# Altium footprint library IPS2050HTR.PcbLib: 3 footprints
Each footprint in its own frame and in the unit in brackets; x right, y up, seen from the top. Pads: shape width x height; smd on the part's side, far side on the other; paste and mask are expansions set on the pad; w line width, h text height; cw(c..) or ccw(c..) is an arc to the next point about the centre after c.
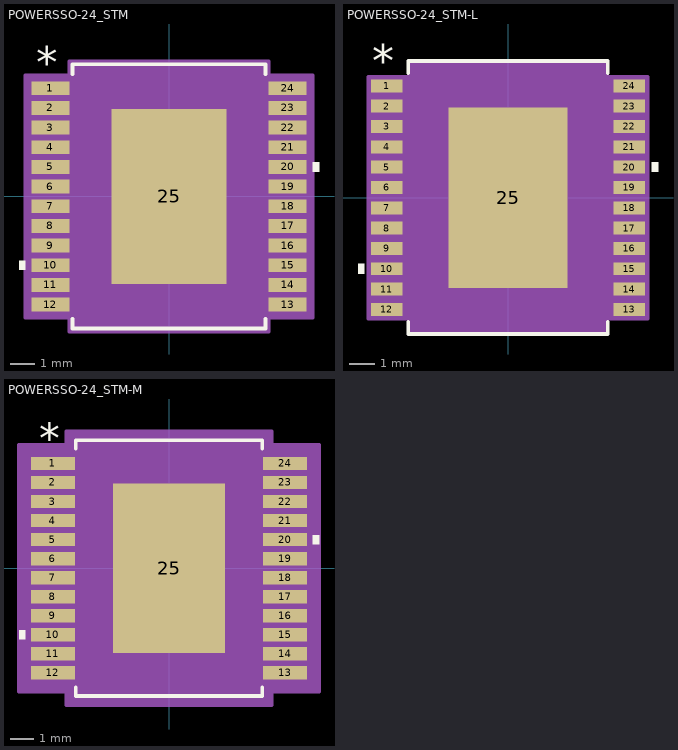
[diagram p0: the footprints below, top view; thin cyan lines are the x and y axes]

## POWERSSO-24_STM [mil]
pads (25):
  rect 60.56x21.97 smd paste+0 mask+0: 1(-190,173.25) 2(-190,141.75) 3(-190,110.25) 4(-190,78.75) 5(-190,47.25) 6(-190,15.75) 7(-190,-15.75) 8(-190,-47.25) 9(-190,-78.75) 10(-190,-110.25) 11(-190,-141.75) 12(-190,-173.25) 13(190,-173.25) 14(190,-141.75) 15(190,-110.25) 16(190,-78.75) 17(190,-47.25) 18(190,-15.75) 19(190,15.75) 20(190,47.25) 21(190,78.75) 22(190,110.25) 23(190,141.75) 24(190,173.25)
  rect 185x280 smd paste-139.5 mask+0: 25(0,0)
Top Overlay:
  region: -230.28,-102.75 -240.28,-102.75 -240.28,-117.75 -230.28,-117.75
  region: 230.28,54.75 240.28,54.75 240.28,39.75 230.28,39.75
  lines w6: -154.5,-196.25 -154.5,-211.5 154.5,-211.5 154.5,-196.25 ; -154.5,196.25 -154.5,211.5 154.5,211.5 154.5,196.25
  text "*" at -212.5,190.22 h50
  text ".Designator" at -137.5,-25 h50
Top Paste:
  region: -34.77,136.06 -88.56,136.06 -88.56,87.94 -34.77,87.94
  region: -34.77,80.06 -88.56,80.06 -88.56,31.94 -34.77,31.94
  region: -34.77,24.06 -88.56,24.06 -88.56,-24.06 -34.77,-24.06
  region: -34.77,-31.94 -88.56,-31.94 -88.56,-80.06 -34.77,-80.06
  region: -34.77,-87.94 -88.56,-87.94 -88.56,-136.06 -34.77,-136.06
  region: 26.9,136.06 -26.9,136.06 -26.9,87.94 26.9,87.94
  region: 26.9,80.06 -26.9,80.06 -26.9,31.94 26.9,31.94
  region: 26.9,24.06 -26.9,24.06 -26.9,-24.06 26.9,-24.06
  region: 26.9,-31.94 -26.9,-31.94 -26.9,-80.06 26.9,-80.06
  region: 26.9,-87.94 -26.9,-87.94 -26.9,-136.06 26.9,-136.06
  region: 88.56,136.06 34.77,136.06 34.77,87.94 88.56,87.94
  region: 88.56,80.06 34.77,80.06 34.77,31.94 88.56,31.94
  region: 88.56,24.06 34.77,24.06 34.77,-24.06 88.56,-24.06
  region: 88.56,-31.94 34.77,-31.94 34.77,-80.06 88.56,-80.06
  region: 88.56,-87.94 34.77,-87.94 34.77,-136.06 88.56,-136.06
Mechanical 13:
  lines w1: -12,206.5 ccw(c0,206.5) 12,206.5 ; -206.5,-183.25 -206.5,-163.25 -149.5,-163.25 -149.5,-183.25 -206.5,-183.25 ; -206.5,-151.75 -206.5,-131.75 -149.5,-131.75 -149.5,-151.75 -206.5,-151.75 ; -206.5,-120.25 -206.5,-100.25 -149.5,-100.25 -149.5,-120.25 -206.5,-120.25 ; -206.5,-88.75 -206.5,-68.75 -149.5,-68.75 -149.5,-88.75 -206.5,-88.75 ; -206.5,-57.25 -206.5,-37.25 -149.5,-37.25 -149.5,-57.25 -206.5,-57.25 ; -206.5,-25.75 -206.5,-5.75 -149.5,-5.75 -149.5,-25.75 -206.5,-25.75 ; -206.5,5.75 -206.5,25.75 -149.5,25.75 -149.5,5.75 -206.5,5.75 ; -206.5,37.25 -206.5,57.25 -149.5,57.25 -149.5,37.25 -206.5,37.25 ; -206.5,68.75 -206.5,88.75 -149.5,88.75 -149.5,68.75 -206.5,68.75 ; -206.5,100.25 -206.5,120.25 -149.5,120.25 -149.5,100.25 -206.5,100.25 ; -206.5,131.75 -206.5,151.75 -149.5,151.75 -149.5,131.75 -206.5,131.75 ; -206.5,163.25 -206.5,183.25 -149.5,183.25 -149.5,163.25 -206.5,163.25 ; -149.5,-206.5 149.5,-206.5 149.5,206.5 -149.5,206.5 -149.5,-206.5 ; 149.5,-183.25 149.5,-163.25 206.5,-163.25 206.5,-183.25 149.5,-183.25 ; 149.5,-151.75 149.5,-131.75 206.5,-131.75 206.5,-151.75 149.5,-151.75 ; 149.5,-120.25 149.5,-100.25 206.5,-100.25 206.5,-120.25 149.5,-120.25 ; 149.5,-88.75 149.5,-68.75 206.5,-68.75 206.5,-88.75 149.5,-88.75 ; 149.5,-57.25 149.5,-37.25 206.5,-37.25 206.5,-57.25 149.5,-57.25 ; 149.5,-25.75 149.5,-5.75 206.5,-5.75 206.5,-25.75 149.5,-25.75 ; 149.5,5.75 149.5,25.75 206.5,25.75 206.5,5.75 149.5,5.75 ; 149.5,37.25 149.5,57.25 206.5,57.25 206.5,37.25 149.5,37.25 ; 149.5,68.75 149.5,88.75 206.5,88.75 206.5,68.75 149.5,68.75 ; 149.5,100.25 149.5,120.25 206.5,120.25 206.5,100.25 149.5,100.25 ; 149.5,131.75 149.5,151.75 206.5,151.75 206.5,131.75 149.5,131.75 ; 149.5,163.25 149.5,183.25 206.5,183.25 206.5,163.25 149.5,163.25
  text ".Designator" at -137.5,-25 h50
  text "*" at -147,153.5 h50
Mechanical 15:
  region: -159.5,-194.23 -230.28,-194.23 -230.28,194.23 -159.5,194.23 -159.5,216.5 159.5,216.5 159.5,194.23 230.28,194.23 230.28,-194.23 159.5,-194.23 159.5,-216.5 -159.5,-216.5
  lines w6: -230.28,-194.23 -230.28,194.23 -159.5,194.23 -159.5,216.5 159.5,216.5 159.5,194.23 230.28,194.23 230.28,-194.23 159.5,-194.23 159.5,-216.5 -159.5,-216.5 -159.5,-194.23 -230.28,-194.23
3D body "POWERSSO-24_STM.step": height 97.09, standoff -2.01, extent -206.5,-206.5 206.5,206.5

## POWERSSO-24_STM-L [mil]
pads (25):
  rect 48.75x20 smd paste+0 mask+0: 1(-188.03,173.25) 2(-188.03,141.75) 3(-188.03,110.25) 4(-188.03,78.75) 5(-188.03,47.25) 6(-188.03,15.75) 7(-188.03,-15.75) 8(-188.03,-47.25) 9(-188.03,-78.75) 10(-188.03,-110.25) 11(-188.03,-141.75) 12(-188.03,-173.25) 13(188.03,-173.25) 14(188.03,-141.75) 15(188.03,-110.25) 16(188.03,-78.75) 17(188.03,-47.25) 18(188.03,-15.75) 19(188.03,15.75) 20(188.03,47.25) 21(188.03,78.75) 22(188.03,110.25) 23(188.03,141.75) 24(188.03,173.25)
  rect 185x280 smd paste-139.5 mask+0: 25(0,0)
Top Overlay:
  region: -222.41,-102.75 -232.41,-102.75 -232.41,-117.75 -222.41,-117.75
  region: 222.41,54.75 232.41,54.75 232.41,39.75 222.41,39.75
  lines w6: -154.5,-192.62 -154.5,-211.5 154.5,-211.5 154.5,-192.62 ; -154.5,192.62 -154.5,211.5 154.5,211.5 154.5,192.62
  text "*" at -210.53,188.25 h50
  text ".Designator" at -137.5,-25 h50
Top Paste:
  region: -34.77,136.06 -88.56,136.06 -88.56,87.94 -34.77,87.94
  region: -34.77,80.06 -88.56,80.06 -88.56,31.94 -34.77,31.94
  region: -34.77,24.06 -88.56,24.06 -88.56,-24.06 -34.77,-24.06
  region: -34.77,-31.94 -88.56,-31.94 -88.56,-80.06 -34.77,-80.06
  region: -34.77,-87.94 -88.56,-87.94 -88.56,-136.06 -34.77,-136.06
  region: 26.9,136.06 -26.9,136.06 -26.9,87.94 26.9,87.94
  region: 26.9,80.06 -26.9,80.06 -26.9,31.94 26.9,31.94
  region: 26.9,24.06 -26.9,24.06 -26.9,-24.06 26.9,-24.06
  region: 26.9,-31.94 -26.9,-31.94 -26.9,-80.06 26.9,-80.06
  region: 26.9,-87.94 -26.9,-87.94 -26.9,-136.06 26.9,-136.06
  region: 88.56,136.06 34.77,136.06 34.77,87.94 88.56,87.94
  region: 88.56,80.06 34.77,80.06 34.77,31.94 88.56,31.94
  region: 88.56,24.06 34.77,24.06 34.77,-24.06 88.56,-24.06
  region: 88.56,-31.94 34.77,-31.94 34.77,-80.06 88.56,-80.06
  region: 88.56,-87.94 34.77,-87.94 34.77,-136.06 88.56,-136.06
Mechanical 13:
  lines w1: -12,206.5 ccw(c0,206.5) 12,206.5 ; -206.5,-183.25 -206.5,-163.25 -149.5,-163.25 -149.5,-183.25 -206.5,-183.25 ; -206.5,-151.75 -206.5,-131.75 -149.5,-131.75 -149.5,-151.75 -206.5,-151.75 ; -206.5,-120.25 -206.5,-100.25 -149.5,-100.25 -149.5,-120.25 -206.5,-120.25 ; -206.5,-88.75 -206.5,-68.75 -149.5,-68.75 -149.5,-88.75 -206.5,-88.75 ; -206.5,-57.25 -206.5,-37.25 -149.5,-37.25 -149.5,-57.25 -206.5,-57.25 ; -206.5,-25.75 -206.5,-5.75 -149.5,-5.75 -149.5,-25.75 -206.5,-25.75 ; -206.5,5.75 -206.5,25.75 -149.5,25.75 -149.5,5.75 -206.5,5.75 ; -206.5,37.25 -206.5,57.25 -149.5,57.25 -149.5,37.25 -206.5,37.25 ; -206.5,68.75 -206.5,88.75 -149.5,88.75 -149.5,68.75 -206.5,68.75 ; -206.5,100.25 -206.5,120.25 -149.5,120.25 -149.5,100.25 -206.5,100.25 ; -206.5,131.75 -206.5,151.75 -149.5,151.75 -149.5,131.75 -206.5,131.75 ; -206.5,163.25 -206.5,183.25 -149.5,183.25 -149.5,163.25 -206.5,163.25 ; -149.5,-206.5 149.5,-206.5 149.5,206.5 -149.5,206.5 -149.5,-206.5 ; 149.5,-183.25 149.5,-163.25 206.5,-163.25 206.5,-183.25 149.5,-183.25 ; 149.5,-151.75 149.5,-131.75 206.5,-131.75 206.5,-151.75 149.5,-151.75 ; 149.5,-120.25 149.5,-100.25 206.5,-100.25 206.5,-120.25 149.5,-120.25 ; 149.5,-88.75 149.5,-68.75 206.5,-68.75 206.5,-88.75 149.5,-88.75 ; 149.5,-57.25 149.5,-37.25 206.5,-37.25 206.5,-57.25 149.5,-57.25 ; 149.5,-25.75 149.5,-5.75 206.5,-5.75 206.5,-25.75 149.5,-25.75 ; 149.5,5.75 149.5,25.75 206.5,25.75 206.5,5.75 149.5,5.75 ; 149.5,37.25 149.5,57.25 206.5,57.25 206.5,37.25 149.5,37.25 ; 149.5,68.75 149.5,88.75 206.5,88.75 206.5,68.75 149.5,68.75 ; 149.5,100.25 149.5,120.25 206.5,120.25 206.5,100.25 149.5,100.25 ; 149.5,131.75 149.5,151.75 206.5,151.75 206.5,131.75 149.5,131.75 ; 149.5,163.25 149.5,183.25 206.5,183.25 206.5,163.25 149.5,163.25
  text ".Designator" at -137.5,-25 h50
  text "*" at -147,153.5 h50
Mechanical 15:
  region: -153.5,-187.25 -216.41,-187.25 -216.41,187.25 -153.5,187.25 -153.5,210.5 153.5,210.5 153.5,187.25 216.41,187.25 216.41,-187.25 153.5,-187.25 153.5,-210.5 -153.5,-210.5
  lines w6: -216.41,-187.25 -216.41,187.25 -153.5,187.25 -153.5,210.5 153.5,210.5 153.5,187.25 216.41,187.25 216.41,-187.25 153.5,-187.25 153.5,-210.5 -153.5,-210.5 -153.5,-187.25 -216.41,-187.25
3D body "POWERSSO-24_STM.step": height 97.09, standoff -2.01, extent -206.5,-206.5 206.5,206.5

## POWERSSO-24_STM-M [mil]
pads (25):
  rect 72.37x21.97 smd paste+0 mask+0: 1(-191.97,173.25) 2(-191.97,141.75) 3(-191.97,110.25) 4(-191.97,78.75) 5(-191.97,47.25) 6(-191.97,15.75) 7(-191.97,-15.75) 8(-191.97,-47.25) 9(-191.97,-78.75) 10(-191.97,-110.25) 11(-191.97,-141.75) 12(-191.97,-173.25) 13(191.97,-173.25) 14(191.97,-141.75) 15(191.97,-110.25) 16(191.97,-78.75) 17(191.97,-47.25) 18(191.97,-15.75) 19(191.97,15.75) 20(191.97,47.25) 21(191.97,78.75) 22(191.97,110.25) 23(191.97,141.75) 24(191.97,173.25)
  rect 185x280 smd paste-139.5 mask+0: 25(0,0)
Top Overlay:
  region: -238.15,-102.75 -248.15,-102.75 -248.15,-117.75 -238.15,-117.75
  region: 238.15,54.75 248.15,54.75 248.15,39.75 238.15,39.75
  lines w6: -154.5,-197.27 -154.5,-211.5 154.5,-211.5 154.5,-197.27 ; -154.5,197.27 -154.5,211.5 154.5,211.5 154.5,197.27
  text "*" at -214.47,190.22 h50
  text ".Designator" at -137.5,-25 h50
Top Paste:
  region: -34.77,136.06 -88.56,136.06 -88.56,87.94 -34.77,87.94
  region: -34.77,80.06 -88.56,80.06 -88.56,31.94 -34.77,31.94
  region: -34.77,24.06 -88.56,24.06 -88.56,-24.06 -34.77,-24.06
  region: -34.77,-31.94 -88.56,-31.94 -88.56,-80.06 -34.77,-80.06
  region: -34.77,-87.94 -88.56,-87.94 -88.56,-136.06 -34.77,-136.06
  region: 26.9,136.06 -26.9,136.06 -26.9,87.94 26.9,87.94
  region: 26.9,80.06 -26.9,80.06 -26.9,31.94 26.9,31.94
  region: 26.9,24.06 -26.9,24.06 -26.9,-24.06 26.9,-24.06
  region: 26.9,-31.94 -26.9,-31.94 -26.9,-80.06 26.9,-80.06
  region: 26.9,-87.94 -26.9,-87.94 -26.9,-136.06 26.9,-136.06
  region: 88.56,136.06 34.77,136.06 34.77,87.94 88.56,87.94
  region: 88.56,80.06 34.77,80.06 34.77,31.94 88.56,31.94
  region: 88.56,24.06 34.77,24.06 34.77,-24.06 88.56,-24.06
  region: 88.56,-31.94 34.77,-31.94 34.77,-80.06 88.56,-80.06
  region: 88.56,-87.94 34.77,-87.94 34.77,-136.06 88.56,-136.06
Mechanical 13:
  lines w1: -12,206.5 ccw(c0,206.5) 12,206.5 ; -206.5,-183.25 -206.5,-163.25 -149.5,-163.25 -149.5,-183.25 -206.5,-183.25 ; -206.5,-151.75 -206.5,-131.75 -149.5,-131.75 -149.5,-151.75 -206.5,-151.75 ; -206.5,-120.25 -206.5,-100.25 -149.5,-100.25 -149.5,-120.25 -206.5,-120.25 ; -206.5,-88.75 -206.5,-68.75 -149.5,-68.75 -149.5,-88.75 -206.5,-88.75 ; -206.5,-57.25 -206.5,-37.25 -149.5,-37.25 -149.5,-57.25 -206.5,-57.25 ; -206.5,-25.75 -206.5,-5.75 -149.5,-5.75 -149.5,-25.75 -206.5,-25.75 ; -206.5,5.75 -206.5,25.75 -149.5,25.75 -149.5,5.75 -206.5,5.75 ; -206.5,37.25 -206.5,57.25 -149.5,57.25 -149.5,37.25 -206.5,37.25 ; -206.5,68.75 -206.5,88.75 -149.5,88.75 -149.5,68.75 -206.5,68.75 ; -206.5,100.25 -206.5,120.25 -149.5,120.25 -149.5,100.25 -206.5,100.25 ; -206.5,131.75 -206.5,151.75 -149.5,151.75 -149.5,131.75 -206.5,131.75 ; -206.5,163.25 -206.5,183.25 -149.5,183.25 -149.5,163.25 -206.5,163.25 ; -149.5,-206.5 149.5,-206.5 149.5,206.5 -149.5,206.5 -149.5,-206.5 ; 149.5,-183.25 149.5,-163.25 206.5,-163.25 206.5,-183.25 149.5,-183.25 ; 149.5,-151.75 149.5,-131.75 206.5,-131.75 206.5,-151.75 149.5,-151.75 ; 149.5,-120.25 149.5,-100.25 206.5,-100.25 206.5,-120.25 149.5,-120.25 ; 149.5,-88.75 149.5,-68.75 206.5,-68.75 206.5,-88.75 149.5,-88.75 ; 149.5,-57.25 149.5,-37.25 206.5,-37.25 206.5,-57.25 149.5,-57.25 ; 149.5,-25.75 149.5,-5.75 206.5,-5.75 206.5,-25.75 149.5,-25.75 ; 149.5,5.75 149.5,25.75 206.5,25.75 206.5,5.75 149.5,5.75 ; 149.5,37.25 149.5,57.25 206.5,57.25 206.5,37.25 149.5,37.25 ; 149.5,68.75 149.5,88.75 206.5,88.75 206.5,68.75 149.5,68.75 ; 149.5,100.25 149.5,120.25 206.5,120.25 206.5,100.25 149.5,100.25 ; 149.5,131.75 149.5,151.75 206.5,151.75 206.5,131.75 149.5,131.75 ; 149.5,163.25 149.5,183.25 206.5,183.25 206.5,163.25 149.5,163.25
  text ".Designator" at -137.5,-25 h50
  text "*" at -147,153.5 h50
Mechanical 15:
  region: -169.5,-204.23 -248.15,-204.23 -248.15,204.23 -169.5,204.23 -169.5,226.5 169.5,226.5 169.5,204.23 248.15,204.23 248.15,-204.23 169.5,-204.23 169.5,-226.5 -169.5,-226.5
  lines w6: -248.15,-204.23 -248.15,204.23 -169.5,204.23 -169.5,226.5 169.5,226.5 169.5,204.23 248.15,204.23 248.15,-204.23 169.5,-204.23 169.5,-226.5 -169.5,-226.5 -169.5,-204.23 -248.15,-204.23
3D body "POWERSSO-24_STM.step": height 97.09, standoff -2.01, extent -206.5,-206.5 206.5,206.5